# Altium footprint library bs_libs.PcbLib: 125 footprints (part 5 of 8)
Each footprint in its own frame and in the unit in brackets; x right, y up, seen from the top. Pads: shape width x height; smd on the part's side, far side on the other; paste and mask are expansions set on the pad; w line width, h text height; cw(c..) or ccw(c..) is an arc to the next point about the centre after c.
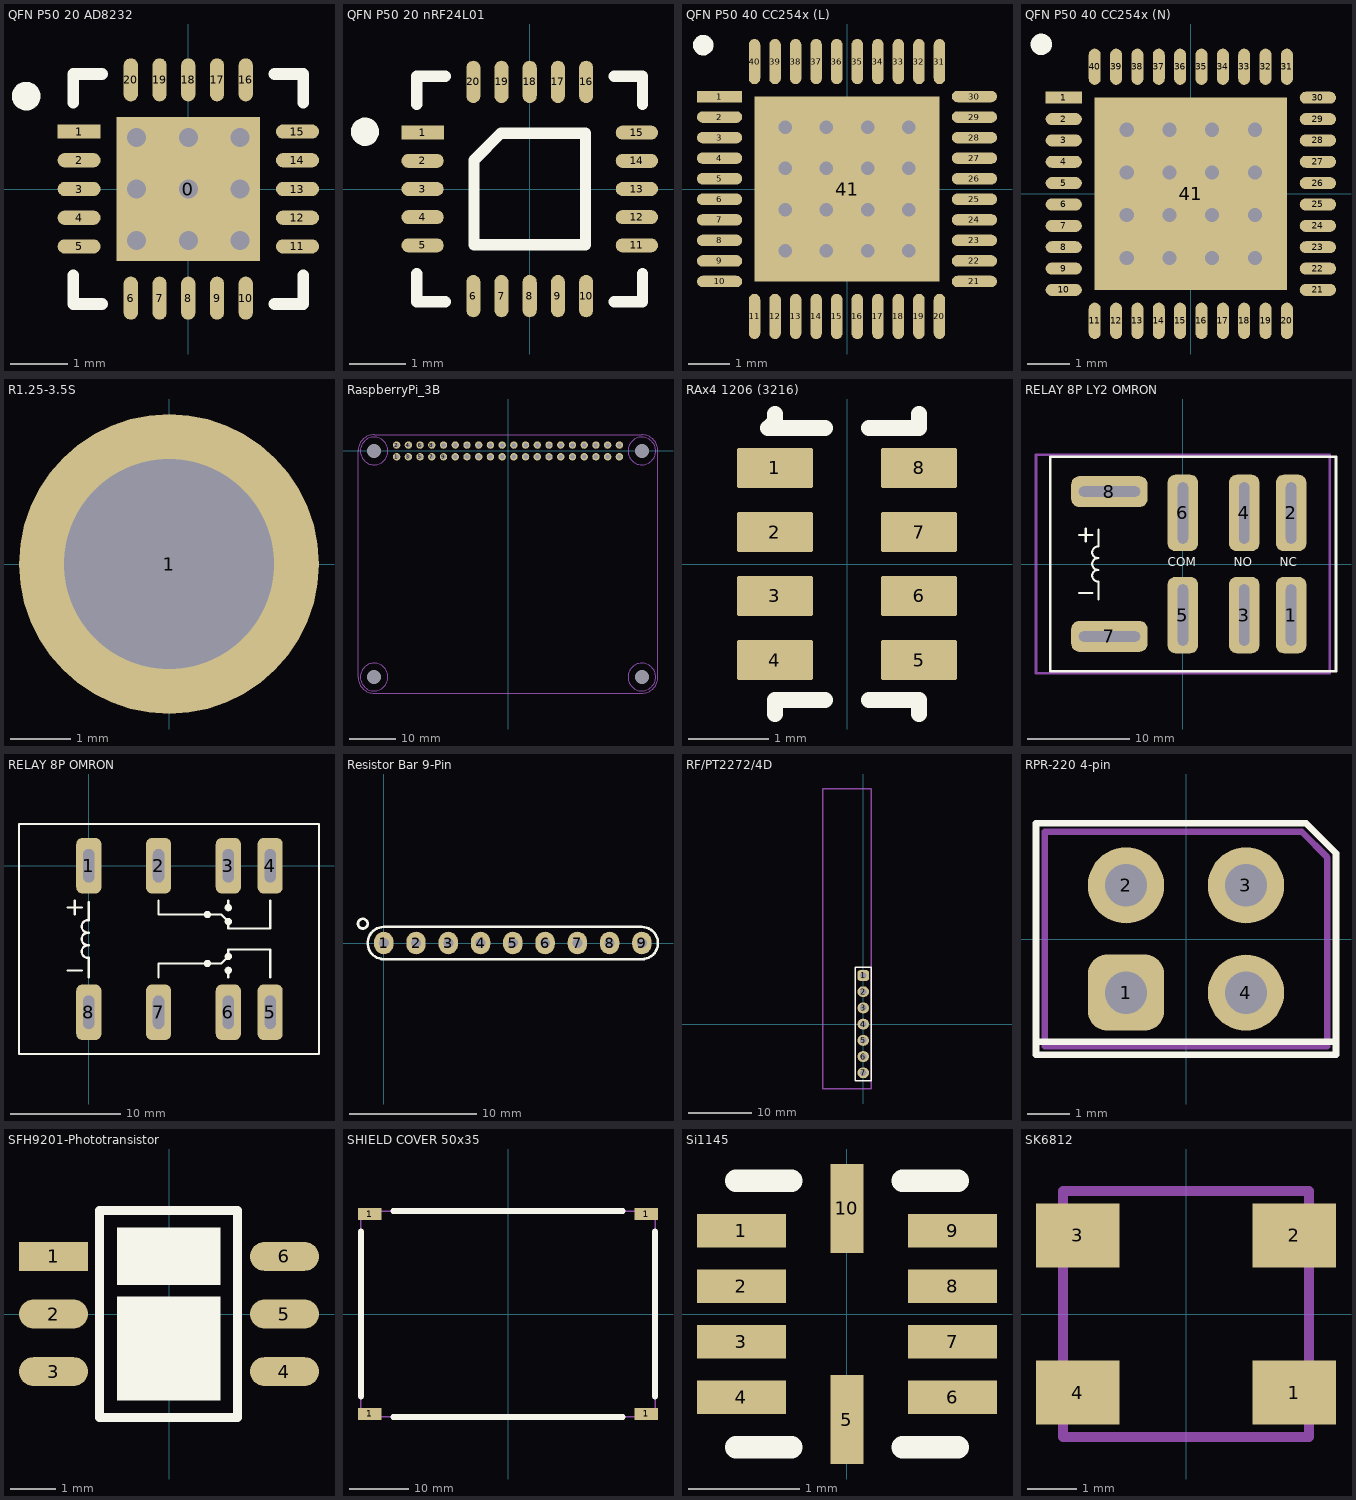
[diagram p4: the footprints below, top view; thin cyan lines are the x and y axes]

## QFN P50 20 AD8232 [mm]
pads (21):
  rect 2.5x2.5 smd: 0(0,0)
  rect 0.75x0.25 smd: 1(-1.9,1)
  oval 0.75x0.25 smd: 2(-1.9,0.5) 3(-1.9,0) 4(-1.9,-0.5) 5(-1.9,-1) 11(1.9,-1) 12(1.9,-0.5) 13(1.9,0) 14(1.9,0.5) 15(1.9,1)
  oval 0.25x0.75 smd: 6(-1,-1.9) 7(-0.5,-1.9) 8(0,-1.9) 9(0.5,-1.9) 10(1,-1.9) 16(1,1.9) 17(0.5,1.9) 18(0,1.9) 19(-0.5,1.9) 20(-1,1.9)
via 0.9,-0.9 diameter 0.66 hole 0.33
via -0.9,-0.9 diameter 0.66 hole 0.33
via 0.9,0.9 diameter 0.66 hole 0.33
via -0.9,0.9 diameter 0.66 hole 0.33
via 0,0.9 diameter 0.66 hole 0.33
via 0,-0.9 diameter 0.66 hole 0.33
via -0.9,0 diameter 0.66 hole 0.33
via 0.9,0 diameter 0.66 hole 0.33
via 0,0 diameter 0.66 hole 0.33
Top Overlay:
  circle w0.25: c-2.821,1.616 r0.125
  lines w0.203: -2,-1.5 -2,-2 -1.5,-2 ; -2,1.5 -2,2 -1.5,2 ; 1.5,-2 2,-2 2,-1.5 ; 1.5,2 2,2 2,1.5
3D body "User Library-QFN20 4x4.step": height 0.72, standoff -0.01, extent -2.025,-2.025 2.025,2.025

## QFN P50 20 nRF24L01 [mm]
pads (20):
  rect 0.75x0.25 smd: 1(-1.9,1)
  oval 0.75x0.25 smd: 2(-1.9,0.5) 3(-1.9,0) 4(-1.9,-0.5) 5(-1.9,-1) 11(1.9,-1) 12(1.9,-0.5) 13(1.9,0) 14(1.9,0.5) 15(1.9,1)
  oval 0.25x0.75 smd: 6(-1,-1.9) 7(-0.5,-1.9) 8(0,-1.9) 9(0.5,-1.9) 10(1,-1.9) 16(1,1.9) 17(0.5,1.9) 18(0,1.9) 19(-0.5,1.9) 20(-1,1.9)
Top Overlay:
  circle w0.25: c-2.921,1.016 r0.125
  lines w0.2: -0.99,-0.99 0.99,-0.99 0.99,0.99 -0.51,0.99 -0.99,0.51 -0.99,-0.99
  lines w0.203: -2,-1.5 -2,-2 -1.5,-2 ; -2,1.5 -2,2 -1.5,2 ; 1.5,-2 2,-2 2,-1.5 ; 1.5,2 2,2 2,1.5
3D body "User Library-NRF24L01P.step": height 1.48, standoff 0, extent -2.01,-2.01 2.01,2.01

## QFN P50 40 CC254x (L) [mm]
pads (41):
  rect 1.1x0.28 smd: 1(-3.1,2.25)
  oval 1.1x0.28 smd: 2(-3.1,1.75) 3(-3.1,1.25) 4(-3.1,0.75) 5(-3.1,0.25) 6(-3.1,-0.25) 7(-3.1,-0.75) 8(-3.1,-1.25) 9(-3.1,-1.75) 10(-3.1,-2.25) 21(3.1,-2.25) 22(3.1,-1.75) 23(3.1,-1.25) 24(3.1,-0.75) 25(3.1,-0.25) 26(3.1,0.25) 27(3.1,0.75) 28(3.1,1.25) 29(3.1,1.75) 30(3.1,2.25)
  oval 0.28x1.1 smd: 11(-2.25,-3.1) 12(-1.75,-3.1) 13(-1.25,-3.1) 14(-0.75,-3.1) 15(-0.25,-3.1) 16(0.25,-3.1) 17(0.75,-3.1) 18(1.25,-3.1) 19(1.75,-3.1) 20(2.25,-3.1) 31(2.25,3.1) 32(1.75,3.1) 33(1.25,3.1) 34(0.75,3.1) 35(0.25,3.1) 36(-0.25,3.1) 37(-0.75,3.1) 38(-1.25,3.1) 39(-1.75,3.1) 40(-2.25,3.1)
  rect 4.5x4.5 smd: 41(0,0)
via -0.5,0.5 diameter 0.66 hole 0.33
via 0.5,0.5 diameter 0.66 hole 0.33
via 0.5,-0.5 diameter 0.66 hole 0.33
via -0.5,-0.5 diameter 0.66 hole 0.33
via -1.5,-0.5 diameter 0.66 hole 0.33
via -1.5,0.5 diameter 0.66 hole 0.33
via 1.5,0.5 diameter 0.66 hole 0.33
via 1.5,-0.5 diameter 0.66 hole 0.33
via 1.5,-1.5 diameter 0.66 hole 0.33
via 0.5,-1.5 diameter 0.66 hole 0.33
via -0.5,-1.5 diameter 0.66 hole 0.33
via -1.5,-1.5 diameter 0.66 hole 0.33
via -1.5,1.5 diameter 0.66 hole 0.33
via -0.5,1.5 diameter 0.66 hole 0.33
via 0.5,1.5 diameter 0.66 hole 0.33
via 1.5,1.5 diameter 0.66 hole 0.33
Top Overlay:
  circle w0.25: c-3.5,3.5 r0.125
3D body "User Library-QFN-40 6x6.STEP": height 1.03, standoff -0.02, extent -3.075,-3.075 3.075,3.075

## QFN P50 40 CC254x (N) [mm]
pads (41):
  rect 0.85x0.28 smd: 1(-2.975,2.25)
  oval 0.85x0.28 smd: 2(-2.975,1.75) 3(-2.975,1.25) 4(-2.975,0.75) 5(-2.975,0.25) 6(-2.975,-0.25) 7(-2.975,-0.75) 8(-2.975,-1.25) 9(-2.975,-1.75) 10(-2.975,-2.25) 21(2.975,-2.25) 22(2.975,-1.75) 23(2.975,-1.25) 24(2.975,-0.75) 25(2.975,-0.25) 26(2.975,0.25) 27(2.975,0.75) 28(2.975,1.25) 29(2.975,1.75) 30(2.975,2.25)
  oval 0.28x0.85 smd: 11(-2.25,-2.975) 12(-1.75,-2.975) 13(-1.25,-2.975) 14(-0.75,-2.975) 15(-0.25,-2.975) 16(0.25,-2.975) 17(0.75,-2.975) 18(1.25,-2.975) 19(1.75,-2.975) 20(2.25,-2.975) 31(2.25,2.975) 32(1.75,2.975) 33(1.25,2.975) 34(0.75,2.975) 35(0.25,2.975) 36(-0.25,2.975) 37(-0.75,2.975) 38(-1.25,2.975) 39(-1.75,2.975) 40(-2.25,2.975)
  rect 4.5x4.5 smd: 41(0,0)
via -0.5,0.5 diameter 0.66 hole 0.33
via 0.5,0.5 diameter 0.66 hole 0.33
via 0.5,-0.5 diameter 0.66 hole 0.33
via -0.5,-0.5 diameter 0.66 hole 0.33
via -1.5,-0.5 diameter 0.66 hole 0.33
via -1.5,0.5 diameter 0.66 hole 0.33
via 1.5,0.5 diameter 0.66 hole 0.33
via 1.5,-0.5 diameter 0.66 hole 0.33
via 1.5,-1.5 diameter 0.66 hole 0.33
via 0.5,-1.5 diameter 0.66 hole 0.33
via -0.5,-1.5 diameter 0.66 hole 0.33
via -1.5,-1.5 diameter 0.66 hole 0.33
via -1.5,1.5 diameter 0.66 hole 0.33
via -0.5,1.5 diameter 0.66 hole 0.33
via 0.5,1.5 diameter 0.66 hole 0.33
via 1.5,1.5 diameter 0.66 hole 0.33
Top Overlay:
  circle w0.25: c-3.5,3.5 r0.125
3D body "User Library-QFN-40 6x6.STEP": height 1.03, standoff -0.02, extent -3.075,-3.075 3.075,3.075

## R1.25-3.5S [mm]
pads (1):
  round 5 hole 3.5: 1(0,0)
3D body "R1.25-3.5S.step": height 7.4, standoff -4.5, extent -1.7,-2.85 1.7,2.85

## RaspberryPi_3B [mm]
pads (44):
  round 1.6 hole 1 unplated: 1(-24.13,-1.27) 2(-24.13,1.27) 3(-21.59,-1.27) 4(-21.59,1.27) 5(-19.05,-1.27) 6(-19.05,1.27) 7(-16.51,-1.27) 8(-16.51,1.27) 9(-13.97,-1.27) 10(-13.97,1.27) 11(-11.43,-1.27) 12(-11.43,1.27) 13(-8.89,-1.27) 14(-8.89,1.27) 15(-6.35,-1.27) 16(-6.35,1.27) 17(-3.81,-1.27) 18(-3.81,1.27) 19(-1.27,-1.27) 20(-1.27,1.27) 21(1.27,-1.27) 22(1.27,1.27) 23(3.81,-1.27) 24(3.81,1.27) 25(6.35,-1.27) 26(6.35,1.27) 27(8.89,-1.27) 28(8.89,1.27) 29(11.43,-1.27) 30(11.43,1.27) 31(13.97,-1.27) 32(13.97,1.27) 33(16.51,-1.27) 34(16.51,1.27) 35(19.05,-1.27) 36(19.05,1.27) 37(21.59,-1.27) 38(21.59,1.27) 39(24.13,-1.27) 40(24.13,1.27)
  round 0 hole 3 unplated: HOLE(-29,-49) HOLE(-29,0) HOLE(29,-49) HOLE(29,0)
Mechanical 1:
  circle w0.2: c-29,-49 r3
  circle w0.2: c29,-49 r3
  circle w0.2: c29,0 r3
  circle w0.2: c-29,0 r3
  lines w0.2: -32.5,-49 ccw(c-29,-49) -29,-52.5 ; -32.5,0 cw(c-29,0) -29,3.5 ; 29,-52.5 ccw(c29,-49) 32.5,-49 ; 29,3.5 cw(c29,0) 32.5,0
  lines w0.203: -32.5,-49 -32.5,0 ; -29,-52.5 29,-52.5 ; -29,3.5 29,3.5 ; 32.5,-49 32.5,0

## RAx4 1206 (3216) [mm] "Resistor Array x4 1206 (4D03)"
height 0.6
pads (8):
  rrect10% 0.95x0.5 smd: 1(-0.9,1.2) 2(-0.9,0.4) 3(-0.9,-0.4) 4(-0.9,-1.2) 5(0.9,-1.2) 6(0.9,-0.4) 7(0.9,0.4) 8(0.9,1.2)
Top Overlay:
  lines w0.2: -0.9,-1.875 -0.9,-1.7 -0.275,-1.7 ; -0.9,1.875 -0.9,1.787 -0.987,1.7 -0.275,1.7 ; 0.275,-1.7 0.9,-1.7 0.9,-1.875 ; 0.275,1.7 0.9,1.7 0.9,1.875
3D body "User Library-Array-1206-4Way-Var2-1.STEP": height 0.5, standoff 0, extent -0.8,-1.6 0.8,1.6

## RELAY 8P LY2 OMRON [mm] "Role OMRON - Vo nhua trong"
pads (8):
  rrect50% 3x7.5 hole 1 slot 6 at 90 deg: 1(10.6,-5) 2(10.6,5) 3(6,-5) 4(6,5) 5(0,-5) 6(0,5)
  rrect50% 7.5x3 hole 1 slot 6 at 0 deg: 7(-7.2,-7.1) 8(-7.2,7.1)
Top Overlay:
  lines w0.203: -10.16,-2.857 -8.89,-2.857 ; -10.16,2.857 -8.89,2.857 ; -9.525,2.222 -9.525,3.492 ; -8.255,-3.492 -8.255,-1.714 cw(c-8.319,-1.143) -8.255,-0.571 cw(c-8.319,0) -8.255,0.572 cw(c-8.319,1.143) -8.255,1.715 -8.255,3.365
  lines w0.254: -13,-10.5 -13,10.5 15,10.5 15,-10.5 -13,-10.5
  text "COM" at -1.5,-0.5 h1.5
  text "NO" at 5,-0.5 h1.5
  text "NC" at 9.5,-0.5 h1.5
Mechanical 1:
  lines w0.254: -14.4,-10.7 14.4,-10.7 14.4,10.7 -14.4,10.7 -14.4,-10.7
3D body "User Library-OMRON LY2 - Relay de Potencia.step": height 35.3, standoff -6.4, extent -13,-10.75 15,10.75

## RELAY 8P OMRON [mil] "Role OMRON - Vo nhua trong"
pads (8):
  rrect50% 90x200 hole 40 slot 120 at 90 deg: 1(0,0) 2(250,0) 3(500,0) 4(650,0) 5(650,-525) 6(500,-525) 7(250,-525) 8(0,-525)
Top Overlay:
  circle w12: c425,-175 r7.07
  circle w12: c500,-150 r7.07
  circle w12: c500,-200 r7.07
  circle w12: c500,-375 r7.07
  circle w12: c500,-325 r7.07
  circle w12: c425,-350 r7.07
  lines w8: -75,-375 -25,-375 ; -75,-150 -25,-150 ; -50,-175 -50,-125 ; 0,-400 0,-330 cw(c-2.5,-307.5) 0,-285 cw(c-2.5,-262.5) 0,-240 cw(c-2.5,-217.5) 0,-195 0,-130 ; 250,-400 250,-350 425,-350 475,-350 500,-325 500,-300 650,-300 650,-400 ; 250,-125 250,-175 425,-175 475,-175 500,-200 500,-225 650,-225 650,-125 ; 500,-400 500,-375 ; 500,-150 500,-125 ; -250,-675 825,-675 825,150 -250,150 -250,-675

## Resistor Bar 9-Pin [mil]
pads (9):
  oval 60x70 hole 31: 1(0,0) 2(100,0) 3(200,0) 4(300,0) 5(400,0) 6(500,0) 7(600,0) 8(700,0) 9(800,0)
Top Overlay:
  circle w8: c-65,60 r15
  lines w8: 0,-50 cw(c0,0) 0,50 800,50 cw(c800,0) 800,-50 0,-50

## RF/PT2272/4D [mm]
pads (7):
  rrect50% 1.8x1.7 hole 1: 1(0,7.62)
  oval 1.8x1.7 hole 1: 2(0,5.08) 3(0,2.54) 4(0,0) 5(0,-2.54) 6(0,-5.08) 7(0,-7.62)
Top Overlay:
  lines w0.203: -1.27,-8.89 1.27,-8.89 1.27,8.89 -1.27,8.89 -1.27,-8.89
Mechanical 1:
  lines w0.203: -6.35,-10.16 -6.35,36.83 1.27,36.83 1.27,-10.16 -6.35,-10.16
3D body "User Library-Header_Male_RA_Low_7Pin.STEP": height 2.51, standoff -3, extent -9.78,-8.89 0.35,8.89
3D body: height 19, standoff 0, extent -5,-10.13 -4,36.87

## RPR-220 4-pin [mil]
pads (4):
  rrect50% 70x70 hole 39: 1(-55.12,-49.21)
  round 70 hole 39: 2(-55.12,49.21) 3(55.12,49.21) 4(55.12,-49.21)
Top Overlay:
  lines w6: -137.8,-94.49 137.8,-94.49 ; -137.8,-106.3 137.8,-106.3 137.8,78.74 110.24,106.3 -137.8,106.3 -137.8,-106.3
Mechanical 1:
  lines w6: -129.92,-98.43 -129.92,98.43 106.3,98.43 129.92,74.8 129.92,-98.43 -129.92,-98.43
3D body: height 50, standoff -50, extent -70,-64.18 -40.12,-34.24
3D body: height 50, standoff -50, extent 40.24,-64.18 70.12,-34.24
3D body: height 50, standoff -50, extent 40.24,34.25 70.12,64.19
3D body: height 50, standoff -50, extent -70,34.25 -40.12,64.19
3D body: height 157.48, standoff 0, extent -129.92,-98.43 129.92,98.43

## SFH9201-Phototransistor [mm]
pads (6):
  rect 1.524x0.635 smd: 1(-2.55,1.27)
  oval 1.524x0.635 smd: 2(-2.55,0) 3(-2.55,-1.27) 4(2.55,-1.27) 5(2.55,0) 6(2.55,1.27)
Top Overlay:
  rectangle: -1.153,0.635 1.133,1.905
  rectangle: -1.153,-1.905 1.133,0.381
  lines w0.2: -1.534,-2.286 -1.534,2.286 1.514,2.286 1.514,-2.286 -1.534,-2.286
3D body "User Library-sensor(sfh 9240).step": height 2.19, standoff -0.01, extent -3.1,-2.1 3.1,2.1

## SHIELD COVER 50x35 [mm]
pads (4):
  rect 4x2 smd: 1(-23.5,-17) 1(-23.5,17) 1(23.5,-17) 1(23.5,17)
Top Overlay:
  lines w1: -25,-14 -25,14 ; -19.5,-17.5 19.5,-17.5 ; -19.5,17.5 19.5,17.5 ; 25,-14 25,14
Mechanical 1:
  lines w0.254: -25,-17.5 -25,17.5 25,17.5 25,-17.5 -25,-17.5
3D body: height 4, standoff 0, extent -25.25,-17.75 -24.75,17.75
3D body: height 4, standoff 0, extent 24.75,-17.75 25.25,17.75
3D body: height 4, standoff 0, extent -25,17.25 25,17.75
3D body: height 4, standoff 0, extent -25,-17.75 25,-17.25

## Si1145 [mm]
pads (10):
  rect 0.8x0.3 smd: 1(-0.95,0.75) 2(-0.95,0.25) 3(-0.95,-0.25) 4(-0.95,-0.75) 6(0.95,-0.75) 7(0.95,-0.25) 8(0.95,0.25) 9(0.95,0.75)
  rect 0.3x0.8 smd: 5(0,-0.95) 10(0,0.95)
Top Overlay:
  lines w0.2: -1,-1.2 -0.5,-1.2 ; -1,1.2 -0.5,1.2 ; 0.5,-1.2 1,-1.2 ; 0.5,1.2 1,1.2
3D body "User Library-QFN8.STEP": height 0.94, standoff -0.01, extent -1.05,-1 1.05,1

## SK6812 [mm] "SK6812"
pads (4):
  rect 1.7x1.3 smd: 1(2.2,-1.6) 2(2.2,1.6) 3(-2.2,1.6) 4(-2.2,-1.6)
Mechanical 1:
  lines w0.203: -2.5,-2.5 2.5,-2.5 2.5,2.5 -2.5,2.5 -2.5,-2.5
3D body "User Library-ws2812B-1.step": height 1.55, standoff -0.02, extent -2.7,-2.5 2.7,2.5